# Altium schematic symbol library GSM.SchLib: 4 symbols
Pins are listed as number, name and electrical type; pins without a type are passive.

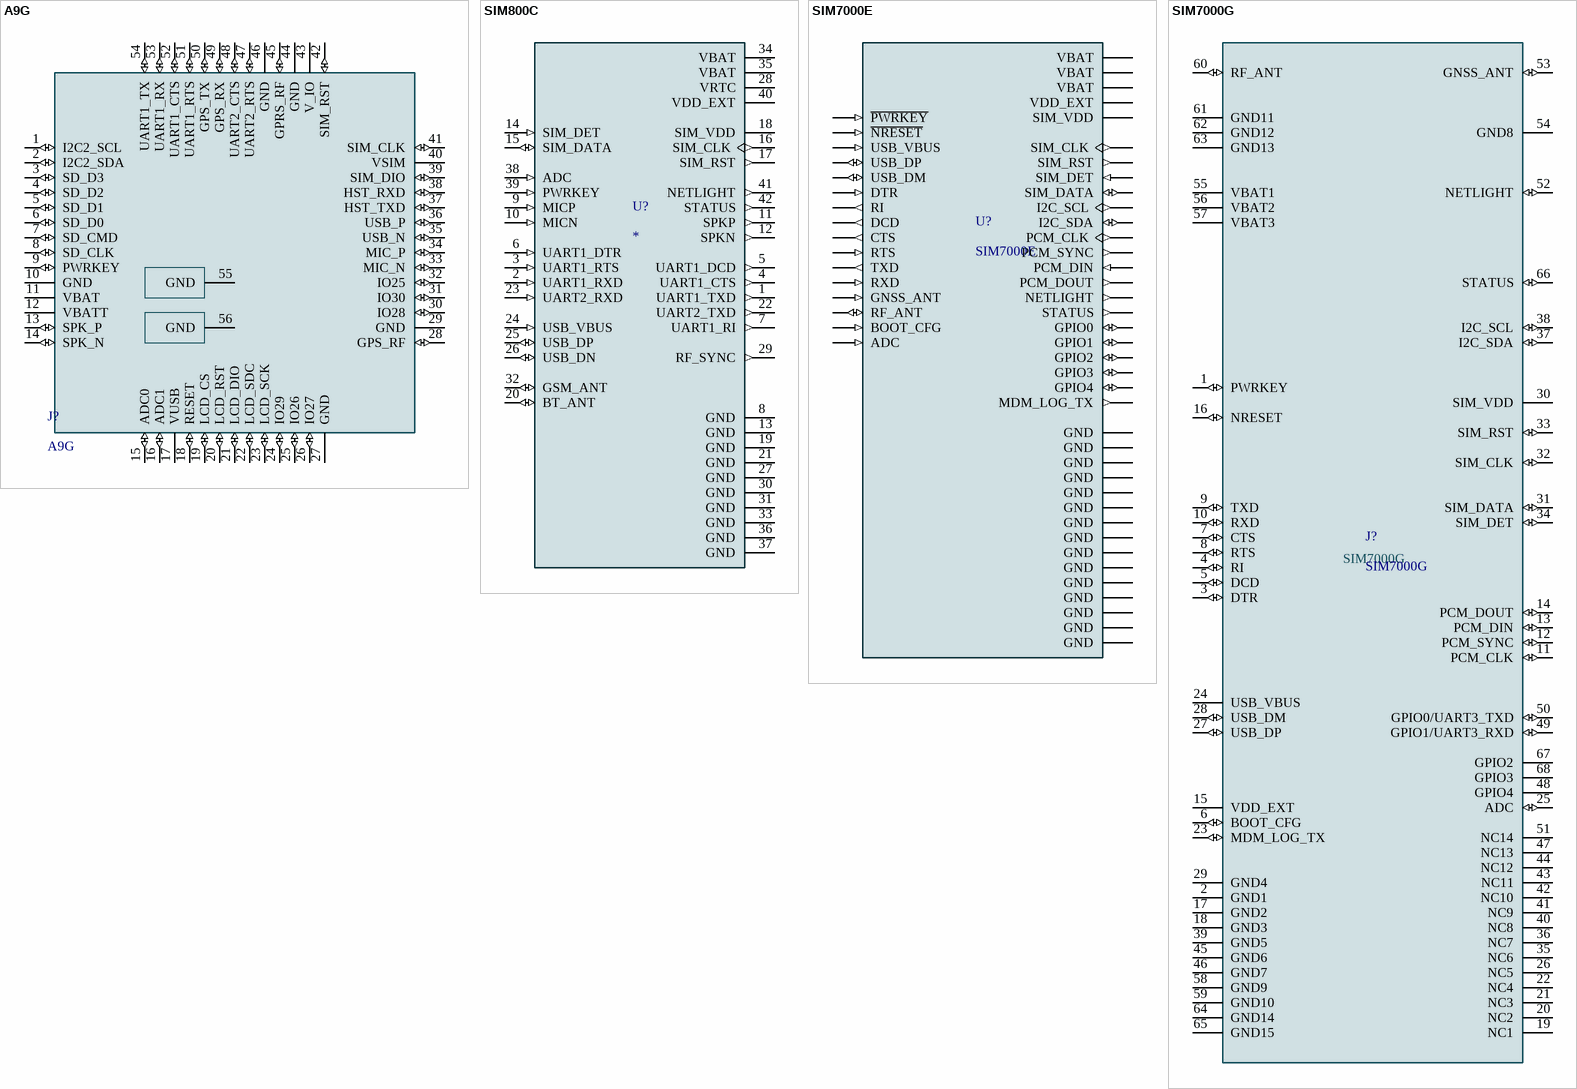
[diagram p0: symbols A9G to SIM7000G]

## A9G
designator J?
Cellular, Navigation Beidou, GNSS, GPRS, GPS, GSM Transceiver Module 800MHz, 900MHz, 1.8GHz, 1.9GHz Antenna Not Included Surface Mount; MF: Ai-Thinker; Package: None; Price: None; Check_prices: https://www.snapeda.com/parts/A9G/AI-Thinker/view-part/?ref=eda; Value: GSM; SnapEDA_Link: https://www.snapeda.com/parts/A9G/AI-Thinker/view-part/?ref=snap; MP: A9G; Availability: In Stock; Purchase-URL: https://pricing.snapeda.com/search?q=A9G&ref=eda
footprint A9G
pins: 1 I2C2_SCL (io), 2 I2C2_SDA (io), 3 SD_D3 (io), 4 SD_D2 (io), 5 SD_D1 (io), 6 SD_D0 (io), 7 SD_CMD (io), 8 SD_CLK (io), 9 PWRKEY (io), 10 GND (power), 11 VBAT (power), 12 VBATT (power), 13 SPK_P (io), 14 SPK_N (io), 15 ADC0 (io), 16 ADC1 (io), 17 VUSB (power), 18 RESET (io), 19 LCD_CS (io), 20 LCD_RST (io), 21 LCD_DIO (io), 22 LCD_SDC (io), 23 LCD_SCK (io), 24 IO29 (io), 25 IO26 (io), 26 IO27 (io), 27 GND (power), 28 GPS_RF (io), 29 GND (power), 30 IO28 (io), 31 IO30 (io), 32 IO25 (io), 33 MIC_N (io), 34 MIC_P (io), 35 USB_N (io), 36 USB_P (io), 37 HST_TXD (io), 38 HST_RXD (io), 39 SIM_DIO (io), 40 VSIM (power), 41 SIM_CLK (io), 42 SIM_RST (io), 43 V_IO (power), 44 GND (power), 45 GPRS_RF (io), 46 GND (power), 47 UART2_RTS (io), 48 UART2_CTS (io), 49 GPS_RX (io), 50 GPS_TX (io), 51 UART1_RTS (io), 52 UART1_CTS (io), 53 UART1_RX (io), 54 UART1_TX (io), 55 GND (power), 56 GND (power)

## SIM800C
designator U?
Module: GSM/Bluetooth; GPRS; 2G; 1800MHz, 900MHz; 85.6kbps; SMD; MP: SIM800C; MF: Simcom; Check_prices: https://www.snapeda.com/parts/SIM800C/SIMcom+Wireless+solutions+Co.%252CLtd/view-part/?ref=eda; Value: *; Availability: In Stock; Price: None; Package: None; SnapEDA_Link: https://www.snapeda.com/parts/SIM800C/SIMcom+Wireless+solutions+Co.%252CLtd/view-part/?ref=snap
footprint SIM800C 32Mbit (LCC110P1570X1760X250-42N)
pins: 1 UART1_TXD (out), 2 UART1_RXD (in), 3 UART1_RTS (in), 4 UART1_CTS (out), 5 UART1_DCD (out), 6 UART1_DTR (in), 7 UART1_RI (out), 8 GND (power), 9 MICP (in), 10 MICN (in), 11 SPKP (out), 12 SPKN (out), 13 GND (power), 14 SIM_DET (in), 15 SIM_DATA (io), 16 SIM_CLK (out), 17 SIM_RST (out), 18 SIM_VDD (power), 19 GND (power), 20 BT_ANT (io), 21 GND (power), 22 UART2_TXD (out), 23 UART2_RXD (in), 24 USB_VBUS (in), 25 USB_DP (io), 26 USB_DN (io), 27 GND (power), 28 VRTC (power), 29 RF_SYNC (out), 30 GND (power), 31 GND (power), 32 GSM_ANT (io), 33 GND (power), 34 VBAT (power), 35 VBAT (power), 36 GND (power), 37 GND (power), 38 ADC (in), 39 PWRKEY (in), 40 VDD_EXT (power), 41 NETLIGHT (out), 42 STATUS (out)

## SIM7000E
designator U?
Multi-Band LTE-FDD and Dual-Band GSM/GPRS/EDGE module solution in a SMT type which supports LTE eMTC(CAT-M1) and NB-IoT up to 375kbps for downlink data transfer.; Package: None; MP: SIM7000E; Price: None; Availability: Unavailable; Value: *
footprint SIM7000E (SIMCON_SIM7000E)
pins: 1 ~{PWRKEY} (in), 2 GND (power), 3 DTR (in), 4 RI (out), 5 DCD (out), 6 BOOT_CFG (in), 7 CTS (out), 8 RTS (in), 9 TXD (out), 10 RXD (in), 11 PCM_CLK (out), 12 PCM_SYNC (out), 13 PCM_DIN (in), 14 PCM_DOUT (out), 15 VDD_EXT (power), 16 ~{NRESET} (in), 17 GND (power), 18 GND (power), 23 MDM_LOG_TX (out), 24 USB_VBUS (in), 25 ADC (in), 27 USB_DP (io), 28 USB_DM (io), 29 GND (power), 30 SIM_VDD (power), 31 SIM_DATA (io), 32 SIM_CLK (out), 33 SIM_RST (out), 34 SIM_DET (in), 37 I2C_SDA (io), 38 I2C_SCL (out), 39 GND (power), 45 GND (power), 46 GND (power), 48 GPIO4 (io), 49 GPIO1 (io), 50 GPIO0 (io), 52 NETLIGHT (out), 53 GNSS_ANT (in), 54 GND (power), 55 VBAT (power), 56 VBAT (power), 57 VBAT (power), 58 GND (power), 59 GND (power), 60 RF_ANT (io), 61 GND (power), 62 GND (power), 63 GND (power), 64 GND (power), 65 GND (power), 66 STATUS (out), 67 GPIO2 (io), 68 GPIO3 (io)

## SIM7000G
designator J?
802.15.4 Cat-M, Cat-NB, EDGE, GPRS, LPWA Transceiver Module 850MHz, 900MHz, 1.8GHz, 1.9GHz Antenna Not Included Surface Mount; MF: SIMCom Wireless Solutions Limited; Package: None; Price: None; Check_prices: https://www.snapeda.com/parts/SIM7000G/SIMCom/view-part/?ref=eda; Value: *; SnapEDA_Link: https://www.snapeda.com/parts/SIM7000G/SIMCom/view-part/?ref=snap; MP: SIM7000G; Availability: In Stock; Purchase-URL: https://pricing.snapeda.com/search?q=SIM7000G&ref=eda
footprint SIM7000G
pins: 1 PWRKEY (io), 2 GND1 (power), 3 DTR (io), 4 RI (io), 5 DCD (io), 6 BOOT_CFG (io), 7 CTS (io), 8 RTS (io), 9 TXD (io), 10 RXD (io), 11 PCM_CLK (io), 12 PCM_SYNC (io), 13 PCM_DIN (io), 14 PCM_DOUT (io), 15 VDD_EXT (power), 16 NRESET (io), 17 GND2 (power), 18 GND3 (power), 19 NC1, 20 NC2, 21 NC3, 22 NC4, 23 MDM_LOG_TX (io), 24 USB_VBUS (power), 25 ADC (io), 26 NC5, 27 USB_DP (io), 28 USB_DM (io), 29 GND4 (power), 30 SIM_VDD (power), 31 SIM_DATA (io), 32 SIM_CLK (io), 33 SIM_RST (io), 34 SIM_DET (io), 35 NC6, 36 NC7, 37 I2C_SDA (io), 38 I2C_SCL (io), 39 GND5 (power), 40 NC8, 41 NC9, 42 NC10, 43 NC11, 44 NC12, 45 GND6 (power), 46 GND7 (power), 47 NC13, 48 GPIO4 (power), 49 GPIO1/UART3_RXD (io), 50 GPIO0/UART3_TXD (io), 51 NC14, 52 NETLIGHT (io), 53 GNSS_ANT (io), 54 GND8 (power), 55 VBAT1 (power), 56 VBAT2 (power), 57 VBAT3 (power), 58 GND9 (power), 59 GND10 (power), 60 RF_ANT (io), 61 GND11 (power), 62 GND12 (power), 63 GND13 (power), 64 GND14 (power), 65 GND15 (power), 66 STATUS (io), 67 GPIO2 (power), 68 GPIO3 (power)